# Altium footprint library PTZ.PcbLib: 51 footprints (part 4 of 4)
Each footprint in its own frame and in the unit in brackets; x right, y up, seen from the top. Pads: shape width x height; smd on the part's side, far side on the other; paste and mask are expansions set on the pad; w line width, h text height; cw(c..) or ccw(c..) is an arc to the next point about the centre after c.
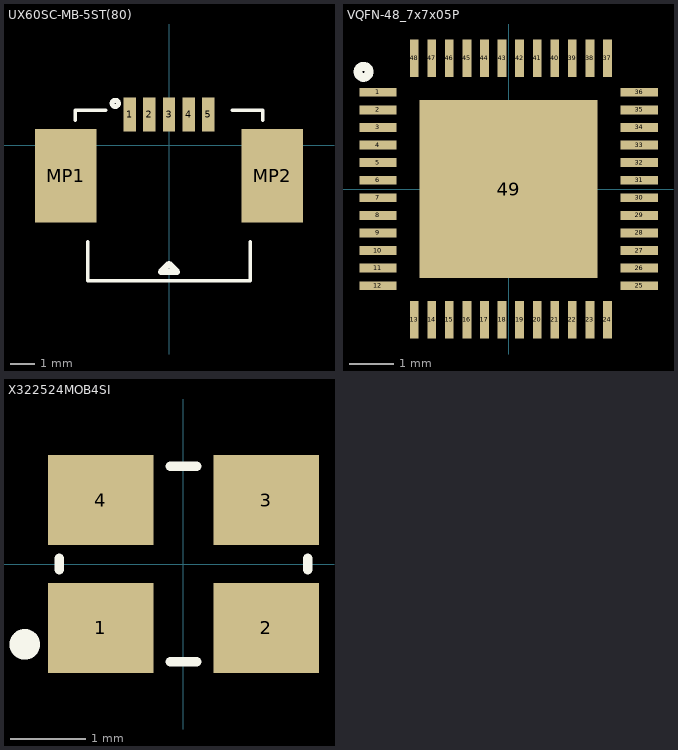
[diagram p3: the footprints below, top view; thin cyan lines are the x and y axes]

## UX60SC-MB-5ST(80) [mm]
pads (7):
  rect 0.5x1.4 smd mask+0.102: 1(-1.6,1.25) 2(-0.8,1.25) 3(0,1.25) 4(0.8,1.25) 5(1.6,1.25)
  rect 2.5x3.8 smd mask+0.102: MP1(-4.2,-1.25) MP2(4.2,-1.25)
Top Overlay:
  circle w0.2: c-2.184,1.702 r0.127
  lines w0.127: -3.81,1.016 -3.81,1.422 -2.565,1.422 ; -3.302,-3.922 -3.302,-5.512 3.302,-5.512 3.302,-3.922 ; 2.565,1.422 3.81,1.422 3.81,1.016
  lines w0.254: -0.33,-5.156 0,-4.826 0.33,-5.156 -0.33,-5.156
3D body "UX60SC-MB-5ST.stp": height 3.95, standoff 0, extent -4.9,-5.512 4.9,1.488

## VQFN-48_7x7x05P [mm]
pads (49):
  rect 0.85x0.2 smd mask+0.102: 1(-2.975,2.2) 2(-2.975,1.8) 3(-2.975,1.4) 4(-2.975,1) 5(-2.975,0.6) 6(-2.975,0.2) 7(-2.975,-0.2) 8(-2.975,-0.6) 9(-2.975,-1) 10(-2.975,-1.4) 11(-2.975,-1.8) 12(-2.975,-2.2) 25(2.975,-2.2) 26(2.975,-1.8) 27(2.975,-1.4) 28(2.975,-1) 29(2.975,-0.6) 30(2.975,-0.2) 31(2.975,0.2) 32(2.975,0.6) 33(2.975,1) 34(2.975,1.4) 35(2.975,1.8) 36(2.975,2.2)
  rect 0.2x0.85 smd mask+0.102: 13(-2.15,-2.975) 14(-1.75,-2.975) 15(-1.35,-2.975) 16(-0.95,-2.975) 17(-0.55,-2.975) 18(-0.15,-2.975) 19(0.25,-2.975) 20(0.65,-2.975) 21(1.05,-2.975) 22(1.45,-2.975) 23(1.85,-2.975) 24(2.25,-2.975) 37(2.25,2.975) 38(1.85,2.975) 39(1.45,2.975) 40(1.05,2.975) 41(0.65,2.975) 42(0.25,2.975) 43(-0.15,2.975) 44(-0.55,2.975) 45(-0.95,2.975) 46(-1.35,2.975) 47(-1.75,2.975) 48(-2.15,2.975)
  rect 4.05x4.05 smd mask+0.102: 49(0,0)
Top Overlay:
  circle w0.2: c-3.302,2.667 r0.127

## X322524MOB4SI [mm]
pads (4):
  rect 1.4x1.2 smd: 1(-1.1,-0.85) 2(1.1,-0.85) 3(1.1,0.85) 4(-1.1,0.85)
Top Overlay:
  circle w0.254: c-2.108,-1.067 r0.076
  lines w0.127: -1.651,-0.076 -1.651,0.076 ; -0.178,-1.295 0.178,-1.295 ; -0.178,1.295 0.178,1.295 ; 1.651,-0.076 1.651,0.076
3D body "ABM8-24.000MHZ-R60-D-1-W-T.STEP": height 0.8, standoff 0, extent -1.6,-1.25 1.6,1.25